# Altium schematic symbol library ST490ABDR.SchLib: 1 symbol
Pins are listed as number, name and electrical type; pins without a type are passive.

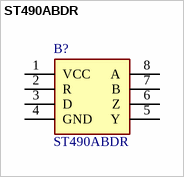
[diagram p0: symbol ST490ABDR]

## ST490ABDR
designator B?
ST490ABDR, Line Transceiver, RS-485, RS-422 50Mbit/s Differential, 5 V, 8-Pin SO; Manufacturer_Name: STMicroelectronics; Geometry.Height: 1.75mm; Manufacturer_Part_Number: ST490ABDR; Mouser Part Number: 511-ST490ABDR; Mouser Price/Stock: https://www.mouser.co.uk/ProductDetail/STMicroelectronics/ST490ABDR?qs=OA2by1ti9iHzlIjKWM8I4A%3D%3D; Arrow Part Number: ST490ABDR; Arrow Price/Stock: https://www.arrow.com/en/products/st490abdr/stmicroelectronics; Datasheet Link: http://www.st.com/st-web-ui/static/active/en/resource/technical/document/datasheet/CD00003152.pdf
footprint SOIC127P600X175-8N
pins: 1 VCC, 2 R, 3 D, 4 GND, 5 Y, 6 Z, 7 B, 8 A